# Altium integrated library XAL6060-562MEC.IntLib: 1 symbol
Pins are listed as number, name and electrical type; pins without a type are passive.

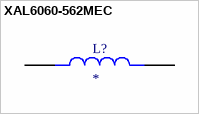
[diagram p0: symbol XAL6060-562MEC]

## XAL6060-562MEC
designator L?
5.6 ÂµH Shielded Molded Inductor 10 A 15.9mOhm Max Nonstandard; MF: Coilcraft; MP: XAL6060-562MEC; SnapEDA_Link: https://www.snapeda.com/parts/XAL6060-562MEC/Coilcraft/view-part/?ref=snap; Package: None; Value: *; Check_prices: https://www.snapeda.com/parts/XAL6060-562MEC/Coilcraft/view-part/?ref=eda
footprint IND_XAL6060-562MEC
pins: 1, 2